# Altium footprint library FPC.PcbLib: 104 footprints (part 7 of 7)
Each footprint in its own frame and in the unit in brackets; x right, y up, seen from the top. Pads: shape width x height; smd on the part's side, far side on the other; paste and mask are expansions set on the pad; w line width, h text height; cw(c..) or ccw(c..) is an arc to the next point about the centre after c.
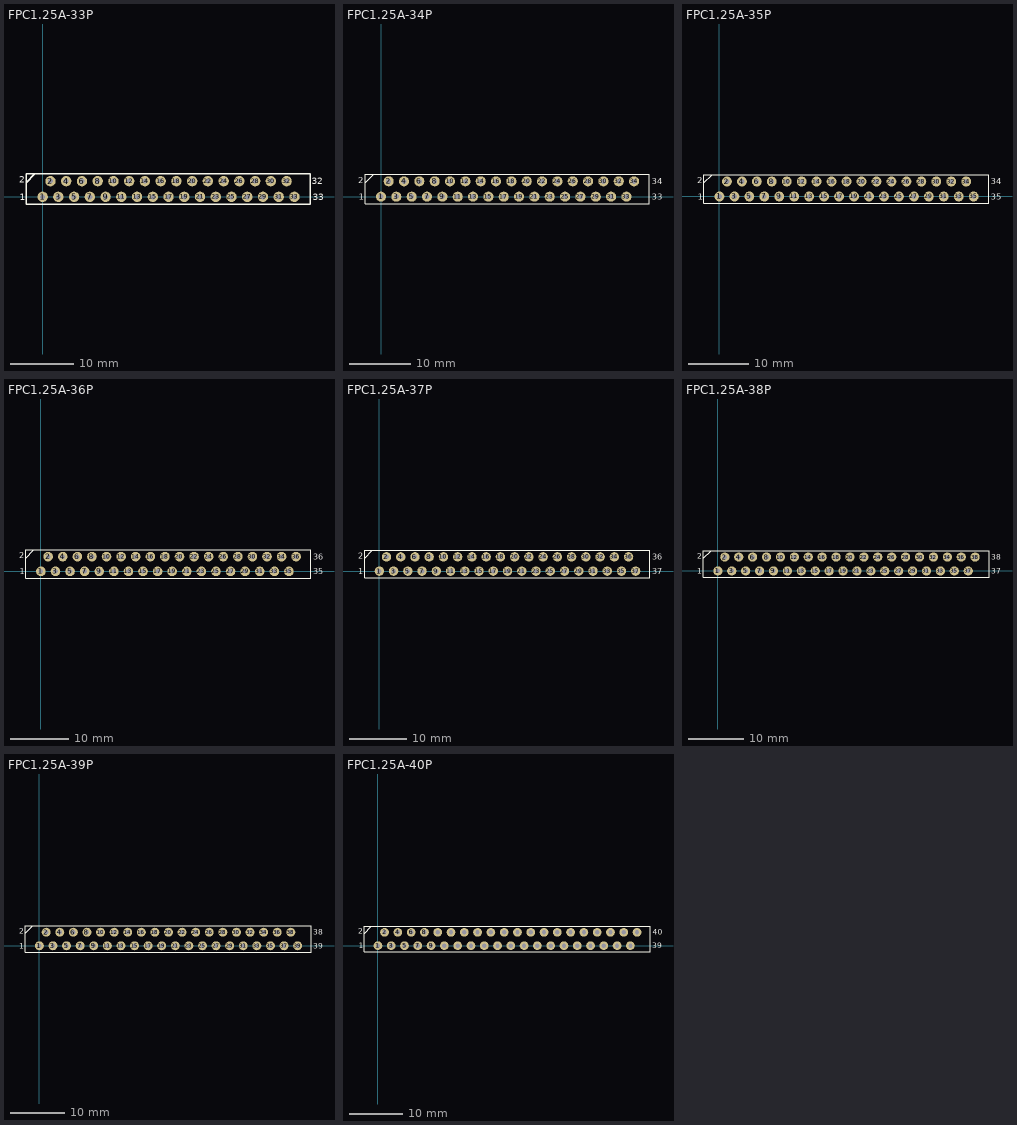
[diagram p6: the footprints below, top view; thin cyan lines are the x and y axes]

## FPC1.25A-33P [mm]
pads (33):
  round 1.65 hole 0.8: 1(0,0) 2(1.25,2.5) 3(2.5,0) 4(3.75,2.5) 5(5,0) 6(6.25,2.5) 7(7.5,0) 8(8.75,2.5) 9(10,0) 10(11.25,2.5) 11(12.5,0) 12(13.75,2.5) 13(15,0) 14(16.25,2.5) 15(17.5,0) 16(18.75,2.5) 17(20,0) 18(21.25,2.5) 19(22.5,0) 20(23.75,2.5) 21(25,0) 22(26.25,2.5) 23(27.5,0) 24(28.75,2.5) 25(30,0) 26(31.25,2.5) 27(32.5,0) 28(33.75,2.5) 29(35,0) 30(36.25,2.5) 31(37.5,0) 32(38.75,2.5) 33(40,0)
Top Overlay:
  lines w0.2: -2.606,2.266 -1.209,3.663 ; -2.606,-1.163 42.5,-1.163 42.5,3.663 -2.606,3.663 -2.606,-1.163
  text "1" at -3.622,-0.528 h1.02
  text "2" at -3.749,2.215 h1.02
  text "32" at 42.733,2.012 h1.02
  text "33" at 42.881,-0.528 h1.02
3D body "FPC1.25-33P.STEP": height 7.3, standoff -2.55, extent -2.413,-0.98 42.437,3.52

## FPC1.25A-34P [mm]
pads (34):
  round 1.65 hole 0.8: 1(0,0) 2(1.25,2.5) 3(2.5,0) 4(3.75,2.5) 5(5,0) 6(6.25,2.5) 7(7.5,0) 8(8.75,2.5) 9(10,0) 10(11.25,2.5) 11(12.5,0) 12(13.75,2.5) 13(15,0) 14(16.25,2.5) 15(17.5,0) 16(18.75,2.5) 17(20,0) 18(21.25,2.5) 19(22.5,0) 20(23.75,2.5) 21(25,0) 22(26.25,2.5) 23(27.5,0) 24(28.75,2.5) 25(30,0) 26(31.25,2.5) 27(32.5,0) 28(33.75,2.5) 29(35,0) 30(36.25,2.5) 31(37.5,0) 32(38.75,2.5) 33(40,0) 34(41.25,2.5)
Top Overlay:
  lines w0.2: -2.606,2.266 -1.209,3.663 ; -2.606,-1.163 43.75,-1.163 43.75,3.663 -2.606,3.663 -2.606,-1.163
  text "1" at -3.632,-0.528 h1.02
  text "2" at -3.749,2.215 h1.02
  text "34" at 44.12,2.012 h1.02
  text "33" at 44.131,-0.528 h1.02
3D body "FPC1.25-34P.STEP": height 7.3, standoff -2.55, extent -2.413,-0.98 43.687,3.52

## FPC1.25A-35P [mm]
pads (35):
  round 1.65 hole 0.8: 1(0,0) 2(1.25,2.5) 3(2.5,0) 4(3.75,2.5) 5(5,0) 6(6.25,2.5) 7(7.5,0) 8(8.75,2.5) 9(10,0) 10(11.25,2.5) 11(12.5,0) 12(13.75,2.5) 13(15,0) 14(16.25,2.5) 15(17.5,0) 16(18.75,2.5) 17(20,0) 18(21.25,2.5) 19(22.5,0) 20(23.75,2.5) 21(25,0) 22(26.25,2.5) 23(27.5,0) 24(28.75,2.5) 25(30,0) 26(31.25,2.5) 27(32.5,0) 28(33.75,2.5) 29(35,0) 30(36.25,2.5) 31(37.5,0) 32(38.75,2.5) 33(40,0) 34(41.25,2.5) 35(42.5,0)
Top Overlay:
  lines w0.2: -2.606,2.266 -1.209,3.663 ; -2.606,-1.163 -2.606,3.663 45,3.663 45,-1.163 -2.606,-1.163
  text "35" at 45.381,-0.528 h1.02
  text "34" at 45.38,2.012 h1.02
  text "2" at -3.749,2.215 h1.02
  text "1" at -3.642,-0.528 h1.02
3D body "FPC1.25-35P.STEP": height 7.3, standoff -2.55, extent -2.392,-0.98 44.958,3.52

## FPC1.25A-36P [mm]
pads (36):
  round 1.65 hole 0.8: 1(0,0) 2(1.25,2.5) 3(2.5,0) 4(3.75,2.5) 5(5,0) 6(6.25,2.5) 7(7.5,0) 8(8.75,2.5) 9(10,0) 10(11.25,2.5) 11(12.5,0) 12(13.75,2.5) 13(15,0) 14(16.25,2.5) 15(17.5,0) 16(18.75,2.5) 17(20,0) 18(21.25,2.5) 19(22.5,0) 20(23.75,2.5) 21(25,0) 22(26.25,2.5) 23(27.5,0) 24(28.75,2.5) 25(30,0) 26(31.25,2.5) 27(32.5,0) 28(33.75,2.5) 29(35,0) 30(36.25,2.5) 31(37.5,0) 32(38.75,2.5) 33(40,0) 34(41.25,2.5) 35(42.5,0) 36(43.75,2.5)
Top Overlay:
  lines w0.2: -2.606,2.266 -1.209,3.663 ; -2.606,-1.163 -2.606,3.663 46.25,3.663 46.25,-1.163 -2.606,-1.163
  text "35" at 46.631,-0.528 h1.02
  text "36" at 46.64,2.012 h1.02
  text "2" at -3.749,2.215 h1.02
  text "1" at -3.652,-0.528 h1.02
3D body "FPC1.25-36P.STEP": height 7.3, standoff -2.55, extent -2.413,-0.98 46.187,3.52

## FPC1.25A-37P [mm]
pads (37):
  round 1.65 hole 0.8: 1(0,0) 2(1.25,2.5) 3(2.5,0) 4(3.75,2.5) 5(5,0) 6(6.25,2.5) 7(7.5,0) 8(8.75,2.5) 9(10,0) 10(11.25,2.5) 11(12.5,0) 12(13.75,2.5) 13(15,0) 14(16.25,2.5) 15(17.5,0) 16(18.75,2.5) 17(20,0) 18(21.25,2.5) 19(22.5,0) 20(23.75,2.5) 21(25,0) 22(26.25,2.5) 23(27.5,0) 24(28.75,2.5) 25(30,0) 26(31.25,2.5) 27(32.5,0) 28(33.75,2.5) 29(35,0) 30(36.25,2.5) 31(37.5,0) 32(38.75,2.5) 33(40,0) 34(41.25,2.5) 35(42.5,0) 36(43.75,2.5) 37(45,0)
Top Overlay:
  lines w0.2: -2.606,2.266 -1.209,3.663 ; -2.606,-1.163 47.5,-1.163 47.5,3.663 -2.606,3.663 -2.606,-1.163
  text "1" at -3.662,-0.528 h1.02
  text "2" at -3.749,2.215 h1.02
  text "36" at 47.9,2.012 h1.02
  text "37" at 47.881,-0.528 h1.02
3D body "FPC1.25-37P.STEP": height 7.3, standoff -2.55, extent -2.413,-0.98 47.437,3.52

## FPC1.25A-38P [mm]
pads (38):
  round 1.65 hole 0.8: 1(0,0) 2(1.25,2.5) 3(2.5,0) 4(3.75,2.5) 5(5,0) 6(6.25,2.5) 7(7.5,0) 8(8.75,2.5) 9(10,0) 10(11.25,2.5) 11(12.5,0) 12(13.75,2.5) 13(15,0) 14(16.25,2.5) 15(17.5,0) 16(18.75,2.5) 17(20,0) 18(21.25,2.5) 19(22.5,0) 20(23.75,2.5) 21(25,0) 22(26.25,2.5) 23(27.5,0) 24(28.75,2.5) 25(30,0) 26(31.25,2.5) 27(32.5,0) 28(33.75,2.5) 29(35,0) 30(36.25,2.5) 31(37.5,0) 32(38.75,2.5) 33(40,0) 34(41.25,2.5) 35(42.5,0) 36(43.75,2.5) 37(45,0) 38(46.25,2.5)
Top Overlay:
  lines w0.2: -2.606,2.266 -1.209,3.663 ; -2.606,-1.163 -2.606,3.663 48.75,3.663 48.75,-1.163 -2.606,-1.163
  text "37" at 49.131,-0.528 h1.02
  text "38" at 49.16,2.012 h1.02
  text "2" at -3.749,2.215 h1.02
  text "1" at -3.672,-0.528 h1.02
3D body "FPC1.25-38P.STEP": height 7.3, standoff -2.55, extent -2.413,-1.016 48.687,3.484

## FPC1.25A-39P [mm]
pads (39):
  round 1.65 hole 0.8: 1(0,0) 2(1.25,2.5) 3(2.5,0) 4(3.75,2.5) 5(5,0) 6(6.25,2.5) 7(7.5,0) 8(8.75,2.5) 9(10,0) 10(11.25,2.5) 11(12.5,0) 12(13.75,2.5) 13(15,0) 14(16.25,2.5) 15(17.5,0) 16(18.75,2.5) 17(20,0) 18(21.25,2.5) 19(22.5,0) 20(23.75,2.5) 21(25,0) 22(26.25,2.5) 23(27.5,0) 24(28.75,2.5) 25(30,0) 26(31.25,2.5) 27(32.5,0) 28(33.75,2.5) 29(35,0) 30(36.25,2.5) 31(37.5,0) 32(38.75,2.5) 33(40,0) 34(41.25,2.5) 35(42.5,0) 36(43.75,2.5) 37(45,0) 38(46.25,2.5) 39(47.5,0)
Top Overlay:
  lines w0.2: -2.606,2.266 -1.209,3.663 ; -2.606,-1.163 -2.606,3.663 50,3.663 50,-1.163 -2.606,-1.163
  text "39" at 50.381,-0.528 h1.02
  text "38" at 50.42,2.012 h1.02
  text "2" at -3.749,2.215 h1.02
  text "1" at -3.682,-0.528 h1.02
3D body "FPC1.25-39P.STEP": height 7.3, standoff -2.55, extent -2.439,-0.98 49.911,3.52

## FPC1.25A-40P [mm]
pads (40):
  round 1.65 hole 0.8: 1(0,0) 2(1.25,2.5) 3(2.5,0) 4(3.75,2.5) 5(5,0) 6(6.25,2.5) 7(7.5,0) 8(8.75,2.5) 9(10,0) 10(11.25,2.5) 11(12.5,0) 12(13.75,2.5) 13(15,0) 14(16.25,2.5) 15(17.5,0) 16(18.75,2.5) 17(20,0) 18(21.25,2.5) 19(22.5,0) 20(23.75,2.5) 21(25,0) 22(26.25,2.5) 23(27.5,0) 24(28.75,2.5) 25(30,0) 26(31.25,2.5) 27(32.5,0) 28(33.75,2.5) 29(35,0) 30(36.25,2.5) 31(37.5,0) 32(38.75,2.5) 33(40,0) 34(41.25,2.5) 35(42.5,0) 36(43.75,2.5) 37(45,0) 38(46.25,2.5) 39(47.5,0) 40(48.75,2.5)
Top Overlay:
  lines w0.2: -2.606,2.266 -1.209,3.663 ; -2.606,-1.163 51.25,-1.163 51.25,3.663 -2.606,3.663 -2.606,-1.163
  text "1" at -3.565,-0.528 h1.02
  text "2" at -3.749,2.215 h1.02
  text "40" at 51.68,2.012 h1.02
  text "39" at 51.631,-0.528 h1.02
3D body "FPC1.25-40P.STEP": height 7.3, standoff -2.55, extent -2.413,-0.98 51.187,3.52